# Altium footprint library Connector.PcbLib: 272 footprints (part 6 of 17)
Each footprint in its own frame and in the unit in brackets; x right, y up, seen from the top. Pads: shape width x height; smd on the part's side, far side on the other; paste and mask are expansions set on the pad; w line width, h text height; cw(c..) or ccw(c..) is an arc to the next point about the centre after c.
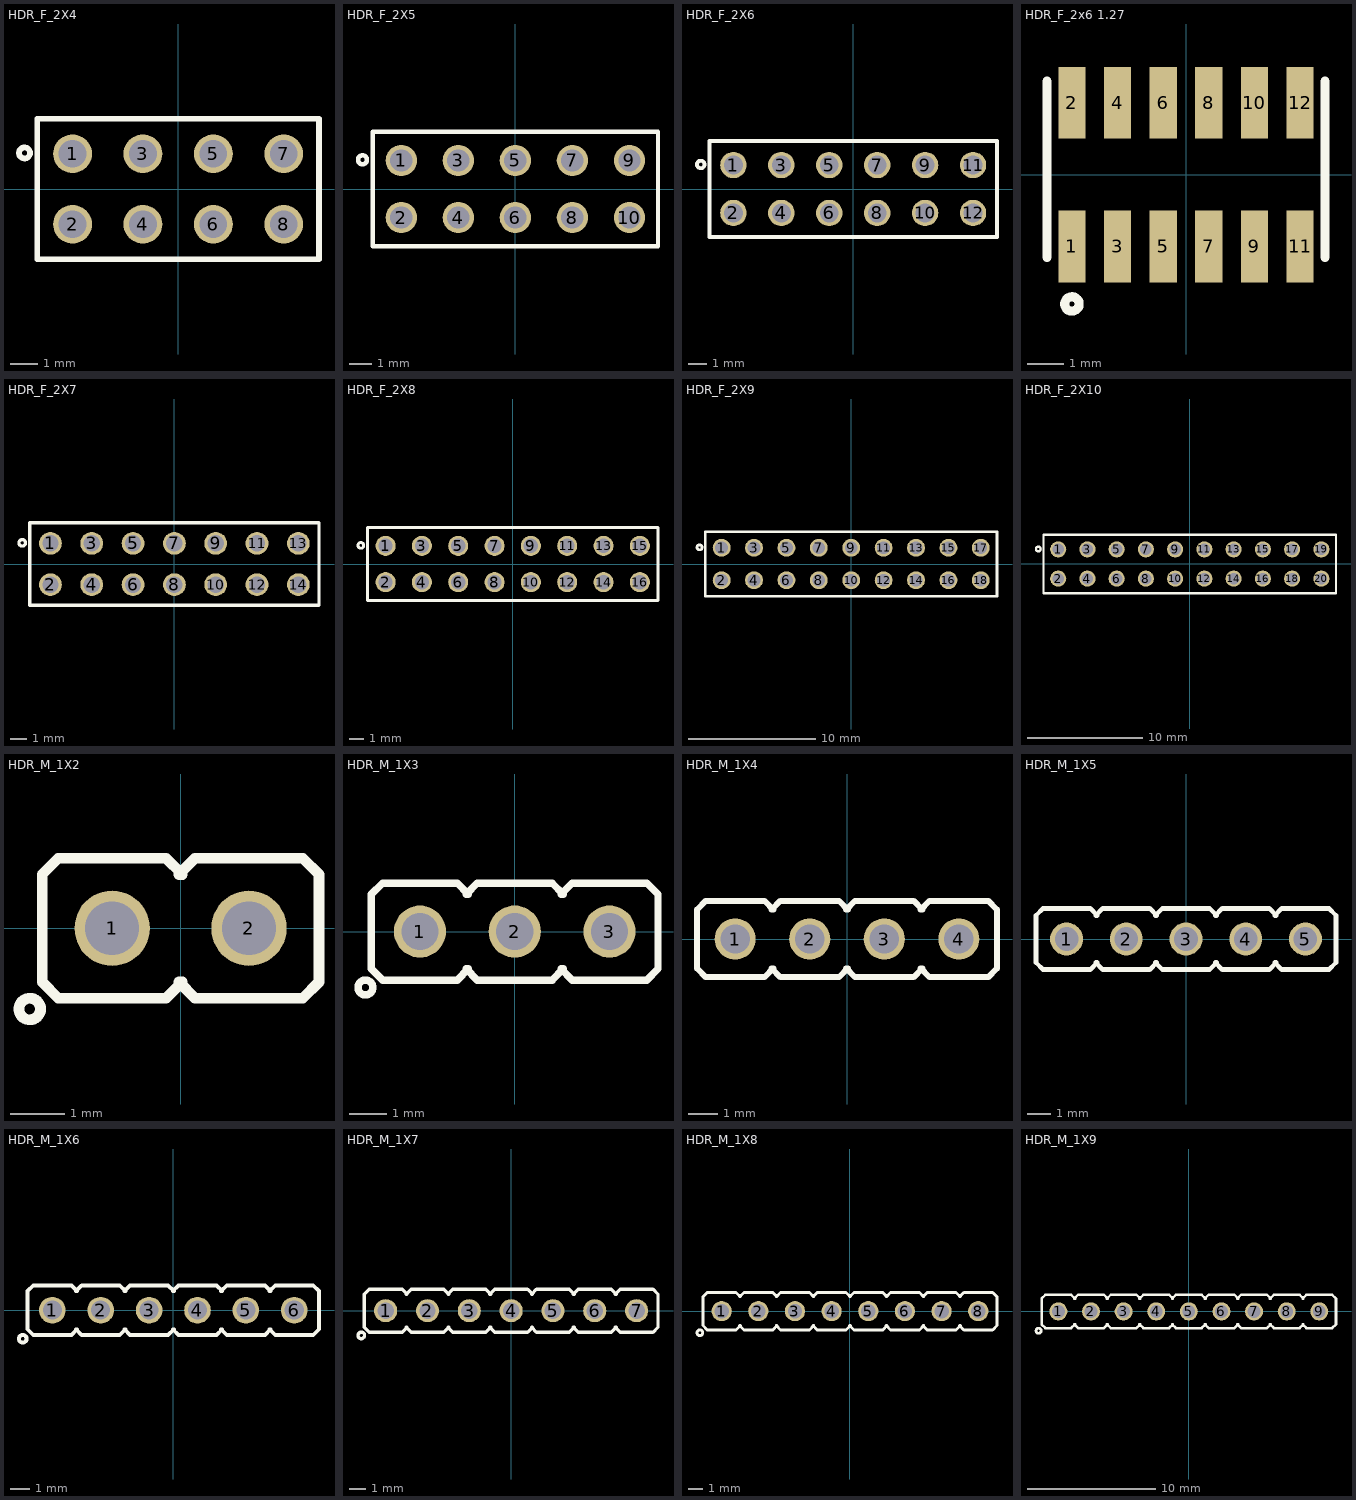
[diagram p5: the footprints below, top view; thin cyan lines are the x and y axes]

## HDR_F_2X4 [mm] "Connector; Header; 4x2 Position"
height 8
pads (8):
  round 1.4 / inner round 1.4 / far side oval 1.4x2.2 hole 1: 1(-3.81,1.27) 2(-3.81,-1.27) 3(-1.27,1.27) 4(-1.27,-1.27) 5(1.27,1.27) 6(1.27,-1.27) 7(3.81,1.27) 8(3.81,-1.27)
Top Overlay:
  circle w0.2: c-5.54,1.3 r0.2
  lines w0.2: -5.08,-2.54 -5.08,2.54 5.08,2.54 5.08,-2.54 -5.08,-2.54
Top Designator:
  text ".Designator" at -4.04,-0.344 h1.52
3D body "PBD-2.stp": height 8.5, standoff -3.15, extent 2.54,-2.54 5.08,2.54
3D body "PBD-2.stp": height 8.5, standoff -3.15, extent 0,-2.54 2.54,2.54
3D body "PBD-2.stp": height 8.5, standoff -3.15, extent -2.54,-2.54 0,2.54
3D body "PBD-2.stp": height 8.5, standoff -3.15, extent -5.08,-2.54 -2.54,2.54

## HDR_F_2X5 [mm] "Connector; Header; 5x2 Position"
height 8
pads (10):
  round 1.4 / inner round 1.4 / far side oval 1.4x2.2 hole 1: 1(-5.08,1.27) 2(-5.08,-1.27) 3(-2.54,1.27) 4(-2.54,-1.27) 5(0,1.27) 6(0,-1.27) 7(2.54,1.27) 8(2.54,-1.27) 9(5.08,1.27) 10(5.08,-1.27)
Top Overlay:
  circle w0.2: c-6.81,1.3 r0.2
  lines w0.2: -6.35,-2.54 -6.35,2.54 6.35,2.54 6.35,-2.54 -6.35,-2.54
Top Designator:
  text ".Designator" at -4.04,-0.344 h1.52
3D body "PBD-2.stp": height 8.5, standoff -3.15, extent 3.81,-2.54 6.35,2.54
3D body "PBD-2.stp": height 8.5, standoff -3.15, extent -1.27,-2.54 1.27,2.54
3D body "PBD-2.stp": height 8.5, standoff -3.15, extent 1.27,-2.54 3.81,2.54
3D body "PBD-2.stp": height 8.5, standoff -3.15, extent -6.35,-2.54 -3.81,2.54
3D body "PBD-2.stp": height 8.5, standoff -3.15, extent -3.81,-2.54 -1.27,2.54

## HDR_F_2X6 [mm] "Connector; Header; 6x2 Position"
height 8
pads (12):
  round 1.4 / inner round 1.4 / far side oval 1.4x2.2 hole 1: 1(-6.35,1.27) 2(-6.35,-1.27) 3(-3.81,1.27) 4(-3.81,-1.27) 5(-1.27,1.27) 6(-1.27,-1.27) 7(1.27,1.27) 8(1.27,-1.27) 9(3.81,1.27) 10(3.81,-1.27) 11(6.35,1.27) 12(6.35,-1.27)
Top Overlay:
  circle w0.2: c-8.08,1.3 r0.2
  lines w0.2: -7.62,-2.54 -7.62,2.54 7.62,2.54 7.62,-2.54 -7.62,-2.54
Top Designator:
  text ".Designator" at -4.04,-0.344 h1.52
3D body "PBD-2.stp": height 8.5, standoff -3.15, extent 2.54,-2.54 5.08,2.54
3D body "PBD-2.stp": height 8.5, standoff -3.15, extent 5.08,-2.54 7.62,2.54
3D body "PBD-2.stp": height 8.5, standoff -3.15, extent -2.54,-2.54 0,2.54
3D body "PBD-2.stp": height 8.5, standoff -3.15, extent 0,-2.54 2.54,2.54
3D body "PBD-2.stp": height 8.5, standoff -3.15, extent -7.62,-2.54 -5.08,2.54
3D body "PBD-2.stp": height 8.5, standoff -3.15, extent -5.08,-2.54 -2.54,2.54

## HDR_F_2x6 1.27 [mm]
pads (12):
  rect 0.76x2 smd: 1(-3.175,-2) 2(-3.175,2) 3(-1.905,-2) 4(-1.905,2) 5(-0.635,-2) 6(-0.635,2) 7(0.635,-2) 8(0.635,2) 9(1.905,-2) 10(1.905,2) 11(3.175,-2) 12(3.175,2)
Top Overlay:
  circle w0.254: c-3.175,-3.6 r0.2
  lines w0.254: -3.873,-2.3 -3.873,2.6 ; 3.873,-2.3 3.873,2.6
Top Designator:
  text ".Designator" at -3.71,-0.757 h1.52
3D body "User Library-1_27x1_27-SMD-female-2x2.step": height 4.51, standoff 0.01, extent -4,-2.2 -1.08,2.4
3D body "User Library-1_27x1_27-SMD-female-2x2.step": height 4.51, standoff 0.01, extent 1.08,-2.2 4,2.4
3D body "User Library-1_27x1_27-SMD-female-2x2.step": height 4.51, standoff 0.01, extent -1.46,-2.2 1.46,2.4

## HDR_F_2X7 [mm] "Connector; Header; 7x2 Position"
height 10.5
pads (14):
  round 1.4 / inner round 1.4 / far side oval 1.4x2.2 hole 1: 1(-7.62,1.27) 2(-7.62,-1.27) 3(-5.08,1.27) 4(-5.08,-1.27) 5(-2.54,1.27) 6(-2.54,-1.27) 7(0,1.27) 8(0,-1.27) 9(2.54,1.27) 10(2.54,-1.27) 11(5.08,1.27) 12(5.08,-1.27) 13(7.62,1.27) 14(7.62,-1.27)
Top Overlay:
  circle w0.2: c-9.35,1.3 r0.2
  lines w0.2: -8.89,-2.54 -8.89,2.54 8.89,2.54 8.89,-2.54 -8.89,-2.54
Top Designator:
  text ".Designator" at -4.04,-0.344 h1.52
3D body "PBD-2.stp": height 8.5, standoff -3.15, extent 6.35,-2.54 8.89,2.54
3D body "PBD-2.stp": height 8.5, standoff -3.15, extent 3.81,-2.54 6.35,2.54
3D body "PBD-2.stp": height 8.5, standoff -3.15, extent 1.27,-2.54 3.81,2.54
3D body "PBD-2.stp": height 8.5, standoff -3.15, extent -1.27,-2.54 1.27,2.54
3D body "PBD-2.stp": height 8.5, standoff -3.15, extent -3.81,-2.54 -1.27,2.54
3D body "PBD-2.stp": height 8.5, standoff -3.15, extent -6.35,-2.54 -3.81,2.54
3D body "PBD-2.stp": height 8.5, standoff -3.15, extent -8.89,-2.54 -6.35,2.54

## HDR_F_2X8 [mm] "Connector; Header; 8x2 Position"
height 8
pads (16):
  round 1.4 / inner round 1.4 / far side oval 1.4x2.2 hole 1: 1(-8.89,1.27) 2(-8.89,-1.27) 3(-6.35,1.27) 4(-6.35,-1.27) 5(-3.81,1.27) 6(-3.81,-1.27) 7(-1.27,1.27) 8(-1.27,-1.27) 9(1.27,1.27) 10(1.27,-1.27) 11(3.81,1.27) 12(3.81,-1.27) 13(6.35,1.27) 14(6.35,-1.27) 15(8.89,1.27) 16(8.89,-1.27)
Top Overlay:
  circle w0.2: c-10.62,1.3 r0.2
  lines w0.2: -10.16,-2.54 10.16,-2.54 10.16,2.54 -10.16,2.54 -10.16,-2.54
Top Designator:
  text ".Designator" at -4.04,-0.344 h1.52
3D body "PBD-2.stp": height 8.5, standoff -3.15, extent -7.62,-2.54 -5.08,2.54
3D body "PBD-2.stp": height 8.5, standoff -3.15, extent -10.16,-2.54 -7.62,2.54
3D body "PBD-2.stp": height 8.5, standoff -3.15, extent -2.54,-2.54 0,2.54
3D body "PBD-2.stp": height 8.5, standoff -3.15, extent -5.08,-2.54 -2.54,2.54
3D body "PBD-2.stp": height 8.5, standoff -3.15, extent 2.54,-2.54 5.08,2.54
3D body "PBD-2.stp": height 8.5, standoff -3.15, extent 0,-2.54 2.54,2.54
3D body "PBD-2.stp": height 8.5, standoff -3.15, extent 7.62,-2.54 10.16,2.54
3D body "PBD-2.stp": height 8.5, standoff -3.15, extent 5.08,-2.54 7.62,2.54

## HDR_F_2X9 [mm] "Connector; Header; 9x2 Position"
height 8
pads (18):
  round 1.4 / inner round 1.4 / far side oval 1.4x2.2 hole 1: 1(-10.16,1.27) 2(-10.16,-1.27) 3(-7.62,1.27) 4(-7.62,-1.27) 5(-5.08,1.27) 6(-5.08,-1.27) 7(-2.54,1.27) 8(-2.54,-1.27) 9(0,1.27) 10(0,-1.27) 11(2.54,1.27) 12(2.54,-1.27) 13(5.08,1.27) 14(5.08,-1.27) 15(7.62,1.27) 16(7.62,-1.27) 17(10.16,1.27) 18(10.16,-1.27)
Top Overlay:
  circle w0.2: c-11.89,1.3 r0.2
  lines w0.2: -11.43,-2.54 11.43,-2.54 11.43,2.54 -11.43,2.54 -11.43,-2.54
Top Designator:
  text ".Designator" at -4.04,-0.344 h1.52
3D body "PBD-2.stp": height 8.5, standoff -3.15, extent 3.81,-2.54 6.35,2.54
3D body "PBD-2.stp": height 8.5, standoff -3.15, extent 6.35,-2.54 8.89,2.54
3D body "PBD-2.stp": height 8.5, standoff -3.15, extent -1.27,-2.54 1.27,2.54
3D body "PBD-2.stp": height 8.5, standoff -3.15, extent 1.27,-2.54 3.81,2.54
3D body "PBD-2.stp": height 8.5, standoff -3.15, extent -6.35,-2.54 -3.81,2.54
3D body "PBD-2.stp": height 8.5, standoff -3.15, extent -3.81,-2.54 -1.27,2.54
3D body "PBD-2.stp": height 8.5, standoff -3.15, extent -11.43,-2.54 -8.89,2.54
3D body "PBD-2.stp": height 8.5, standoff -3.15, extent -8.89,-2.54 -6.35,2.54
3D body "PBD-2.stp": height 8.5, standoff -3.15, extent 8.89,-2.54 11.43,2.54

## HDR_F_2X10 [mm] "Connector; Header; 10x2 Position"
height 8
pads (20):
  round 1.4 / inner round 1.4 / far side oval 1.4x2.2 hole 1: 1(-11.43,1.27) 2(-11.43,-1.27) 3(-8.89,1.27) 4(-8.89,-1.27) 5(-6.35,1.27) 6(-6.35,-1.27) 7(-3.81,1.27) 8(-3.81,-1.27) 9(-1.27,1.27) 10(-1.27,-1.27) 11(1.27,1.27) 12(1.27,-1.27) 13(3.81,1.27) 14(3.81,-1.27) 15(6.35,1.27) 16(6.35,-1.27) 17(8.89,1.27) 18(8.89,-1.27) 19(11.43,1.27) 20(11.43,-1.27)
Top Overlay:
  circle w0.2: c-13.16,1.3 r0.2
  lines w0.2: -12.7,-2.54 -12.7,2.54 12.7,2.54 12.7,-2.54 -12.7,-2.54
Top Designator:
  text ".Designator" at -4.04,-0.344 h1.52
3D body "PBD-2.stp": height 8.5, standoff -3.15, extent -12.7,-2.54 -10.16,2.54
3D body "PBD-2.stp": height 8.5, standoff -3.15, extent 10.16,-2.54 12.7,2.54
3D body "PBD-2.stp": height 8.5, standoff -3.15, extent 7.62,-2.54 10.16,2.54
3D body "PBD-2.stp": height 8.5, standoff -3.15, extent 5.08,-2.54 7.62,2.54
3D body "PBD-2.stp": height 8.5, standoff -3.15, extent 2.54,-2.54 5.08,2.54
3D body "PBD-2.stp": height 8.5, standoff -3.15, extent 0,-2.54 2.54,2.54
3D body "PBD-2.stp": height 8.5, standoff -3.15, extent -2.54,-2.54 0,2.54
3D body "PBD-2.stp": height 8.5, standoff -3.15, extent -5.08,-2.54 -2.54,2.54
3D body "PBD-2.stp": height 8.5, standoff -3.15, extent -7.62,-2.54 -5.08,2.54
3D body "PBD-2.stp": height 8.5, standoff -3.15, extent -10.16,-2.54 -7.62,2.54

## HDR_M_1X2 [mm] "Connector; Header; 2 Position"
pads (2):
  round 1.4 / inner round 1.4 / far side oval 1.4x2.2 hole 1 mask+0.1: 1(-1.27,0) 2(1.27,0)
Top Overlay:
  circle w0.2: c-2.8,-1.5 r0.2
  lines w0.2: -0.03,-1 0.27,-1.3 2.27,-1.3 2.57,-1 2.57,1 2.27,1.3 0.27,1.3 -0.03,1 ; 0.03,-1 -0.27,-1.3 -2.27,-1.3 -2.57,-1 -2.57,1 -2.27,1.3 -0.27,1.3 0.03,1
Top Designator:
  text ".Designator" at -3.925,-0.544 h1.52
3D body "pin_header_aw140-eg-g02a.stp": height 8.72, standoff -3.68, extent -2.54,-1.25 2.44,1.25

## HDR_M_1X3 [mm] "Connector; Header; 3 Position"
pads (3):
  round 1.4 / inner round 1.4 / far side oval 1.4x2.2 hole 1 mask+0.1: 1(-2.54,0) 2(0,0) 3(2.54,0)
Top Overlay:
  circle w0.2: c-4,-1.5 r0.2
  lines w0.2: -1.3,-1 -1,-1.3 1,-1.3 1.3,-1 ; -1.3,1 -1,1.3 1,1.3 1.3,1 ; -1.24,-1 -1.54,-1.3 -3.54,-1.3 -3.84,-1 -3.84,1 -3.54,1.3 -1.54,1.3 -1.24,1 ; 1.24,-1 1.54,-1.3 3.54,-1.3 3.84,-1 3.84,1 3.54,1.3 1.54,1.3 1.24,1
Top Designator:
  text ".Designator" at -3.89,-0.544 h1.52
3D body "pin_header_aw140-eg-g03d.stp": height 8.2, standoff -3, extent -3.81,-1.249 3.81,1.249

## HDR_M_1X4 [mm] "Connector; Header; 2 Position"
pads (4):
  round 1.4 / inner round 1.4 / far side oval 1.4x2.2 hole 1 mask+0.1: 1(-3.81,0) 2(-1.27,0) 3(1.27,0) 4(3.81,0)
Top Overlay:
  lines w0.2: -2.57,-1 -2.27,-1.3 -0.27,-1.3 0.03,-1 ; -2.57,1 -2.27,1.3 -0.27,1.3 0.03,1 ; -2.51,-1 -2.81,-1.3 -4.81,-1.3 -5.11,-1 -5.11,1 -4.81,1.3 -2.81,1.3 -2.51,1 ; -0.03,-1 0.27,-1.3 2.27,-1.3 2.57,-1 ; -0.03,1 0.27,1.3 2.27,1.3 2.57,1 ; 2.51,-1 2.81,-1.3 4.81,-1.3 5.11,-1 5.11,1 4.81,1.3 2.81,1.3 2.51,1
Top Designator:
  text ".Designator" at -3.71,-0.344 h1.52
3D body "pin_header_aw140-eg-g02a.stp": height 8.72, standoff -3.68, extent -5.08,-1.25 -0.1,1.25
3D body "pin_header_aw140-eg-g02a.stp": height 8.72, standoff -3.68, extent -2.54,-1.25 2.44,1.25
3D body "pin_header_aw140-eg-g02a.stp": height 8.72, standoff -3.68, extent 0,-1.25 4.98,1.25

## HDR_M_1X5 [mm] "Connector; Header; 2 Position"
pads (5):
  round 1.4 / inner round 1.4 / far side oval 1.4x2.2 hole 1 mask+0.1: 1(-5.08,0) 2(-2.54,0) 3(0,0) 4(2.54,0) 5(5.08,0)
Top Overlay:
  lines w0.2: -3.84,-1 -3.54,-1.3 -1.54,-1.3 -1.24,-1 ; -3.84,1 -3.54,1.3 -1.54,1.3 -1.24,1 ; -3.78,-1 -4.08,-1.3 -6.08,-1.3 -6.38,-1 -6.38,1 -6.08,1.3 -4.08,1.3 -3.78,1 ; -1.3,-1 -1,-1.3 1,-1.3 1.3,-1 ; -1.3,1 -1,1.3 1,1.3 1.3,1 ; 1.24,-1 1.54,-1.3 3.54,-1.3 3.84,-1 ; 1.24,1 1.54,1.3 3.54,1.3 3.84,1 ; 3.78,-1 4.08,-1.3 6.08,-1.3 6.38,-1 6.38,1 6.08,1.3 4.08,1.3 3.78,1
Top Designator:
  text ".Designator" at -3.71,-0.344 h1.52
3D body "pin_header_aw140-eg-g02a.stp": height 8.72, standoff -3.68, extent -6.35,-1.25 -1.37,1.25
3D body "pin_header_aw140-eg-g02a.stp": height 8.72, standoff -3.68, extent -3.81,-1.25 1.17,1.25
3D body "pin_header_aw140-eg-g02a.stp": height 8.72, standoff -3.68, extent -1.27,-1.25 3.71,1.25
3D body "pin_header_aw140-eg-g02a.stp": height 8.72, standoff -3.68, extent 1.27,-1.25 6.25,1.25

## HDR_M_1X6 [mm] "Connector; Header; 6 Position"
pads (6):
  round 1.4 / inner round 1.4 / far side oval 1.4x2.2 hole 1 mask+0.1: 1(-6.35,0) 2(-3.81,0) 3(-1.27,0) 4(1.27,0) 5(3.81,0) 6(6.35,0)
Top Overlay:
  circle w0.2: c-7.9,-1.5 r0.2
  lines w0.2: -5.11,-1 -4.81,-1.3 -2.81,-1.3 -2.51,-1 ; -5.11,1 -4.81,1.3 -2.81,1.3 -2.51,1 ; -5.05,-1 -5.35,-1.3 -7.35,-1.3 -7.65,-1 -7.65,1 -7.35,1.3 -5.35,1.3 -5.05,1 ; -2.57,-1 -2.27,-1.3 -0.27,-1.3 0.03,-1 ; -2.57,1 -2.27,1.3 -0.27,1.3 0.03,1 ; -0.03,-1 0.27,-1.3 2.27,-1.3 2.57,-1 ; -0.03,1 0.27,1.3 2.27,1.3 2.57,1 ; 2.51,-1 2.81,-1.3 4.81,-1.3 5.11,-1 ; 2.51,1 2.81,1.3 4.81,1.3 5.11,1 ; 5.05,-1 5.35,-1.3 7.35,-1.3 7.65,-1 7.65,1 7.35,1.3 5.35,1.3 5.05,1
Top Designator:
  text ".Designator" at -3.935,-0.544 h1.52
3D body "pin_header_aw140-eg-g06d.stp": height 8.2, standoff -3, extent -7.62,-1.249 7.62,1.249

## HDR_M_1X7 [mm] "Connector; Header; 7 Position"
pads (7):
  round 1.4 / inner round 1.4 / far side oval 1.4x2.2 hole 1 mask+0.1: 1(-7.62,0) 2(-5.08,0) 3(-2.54,0) 4(0,0) 5(2.54,0) 6(5.08,0) 7(7.62,0)
Top Overlay:
  circle w0.2: c-9.1,-1.5 r0.2
  lines w0.2: -6.38,-1 -6.08,-1.3 -4.08,-1.3 -3.78,-1 ; -6.38,1 -6.08,1.3 -4.08,1.3 -3.78,1 ; -6.32,-1 -6.62,-1.3 -8.62,-1.3 -8.92,-1 -8.92,1 -8.62,1.3 -6.62,1.3 -6.32,1 ; -3.84,-1 -3.54,-1.3 -1.54,-1.3 -1.24,-1 ; -3.84,1 -3.54,1.3 -1.54,1.3 -1.24,1 ; -1.3,-1 -1,-1.3 1,-1.3 1.3,-1 ; -1.3,1 -1,1.3 1,1.3 1.3,1 ; 1.24,-1 1.54,-1.3 3.54,-1.3 3.84,-1 ; 1.24,1 1.54,1.3 3.54,1.3 3.84,1 ; 3.78,-1 4.08,-1.3 6.08,-1.3 6.38,-1 ; 3.78,1 4.08,1.3 6.08,1.3 6.38,1 ; 6.32,-1 6.62,-1.3 8.62,-1.3 8.92,-1 8.92,1 8.62,1.3 6.62,1.3 6.32,1
Top Designator:
  text ".Designator" at -3.9,-0.544 h1.52
3D body "pin_header_aw140-eg-g07d.stp": height 8.2, standoff -3, extent -8.89,-1.249 8.89,1.249

## HDR_M_1X8 [mm] "Connector; Header; 8 Position"
pads (8):
  round 1.4 / inner round 1.4 / far side oval 1.4x2.2 hole 1 mask+0.1: 1(-8.89,0) 2(-6.35,0) 3(-3.81,0) 4(-1.27,0) 5(1.27,0) 6(3.81,0) 7(6.35,0) 8(8.89,0)
Top Overlay:
  circle w0.2: c-10.4,-1.5 r0.2
  lines w0.2: -7.65,-1 -7.35,-1.3 -5.35,-1.3 -5.05,-1 ; -7.65,1 -7.35,1.3 -5.35,1.3 -5.05,1 ; -7.59,-1 -7.89,-1.3 -9.89,-1.3 -10.19,-1 -10.19,1 -9.89,1.3 -7.89,1.3 -7.59,1 ; -5.11,-1 -4.81,-1.3 -2.81,-1.3 -2.51,-1 ; -5.11,1 -4.81,1.3 -2.81,1.3 -2.51,1 ; -2.57,-1 -2.27,-1.3 -0.27,-1.3 0.03,-1 ; -2.57,1 -2.27,1.3 -0.27,1.3 0.03,1 ; -0.03,-1 0.27,-1.3 2.27,-1.3 2.57,-1 ; -0.03,1 0.27,1.3 2.27,1.3 2.57,1 ; 2.51,-1 2.81,-1.3 4.81,-1.3 5.11,-1 ; 2.51,1 2.81,1.3 4.81,1.3 5.11,1 ; 5.05,-1 5.35,-1.3 7.35,-1.3 7.65,-1 ; 5.05,1 5.35,1.3 7.35,1.3 7.65,1 ; 7.59,-1 7.89,-1.3 9.89,-1.3 10.19,-1 10.19,1 9.89,1.3 7.89,1.3 7.59,1
Top Designator:
  text ".Designator" at -3.915,-0.544 h1.52
3D body "pin_header_aw140-eg-g08d.stp": height 8.2, standoff -3, extent -10.16,-1.249 10.16,1.249

## HDR_M_1X9 [mm] "Connector; Header; 9 Position"
pads (9):
  round 1.4 / inner round 1.4 / far side oval 1.4x2.2 hole 1 mask+0.1: 1(-10.16,0) 2(-7.62,0) 3(-5.08,0) 4(-2.54,0) 5(0,0) 6(2.54,0) 7(5.08,0) 8(7.62,0) 9(10.16,0)
Top Overlay:
  circle w0.2: c-11.7,-1.5 r0.2
  lines w0.2: -8.92,-1 -8.62,-1.3 -6.62,-1.3 -6.32,-1 ; -8.92,1 -8.62,1.3 -6.62,1.3 -6.32,1 ; -8.86,-1 -9.16,-1.3 -11.16,-1.3 -11.46,-1 -11.46,1 -11.16,1.3 -9.16,1.3 -8.86,1 ; -6.38,-1 -6.08,-1.3 -4.08,-1.3 -3.78,-1 ; -6.38,1 -6.08,1.3 -4.08,1.3 -3.78,1 ; -3.84,-1 -3.54,-1.3 -1.54,-1.3 -1.24,-1 ; -3.84,1 -3.54,1.3 -1.54,1.3 -1.24,1 ; -1.3,-1 -1,-1.3 1,-1.3 1.3,-1 ; -1.3,1 -1,1.3 1,1.3 1.3,1 ; 1.24,-1 1.54,-1.3 3.54,-1.3 3.84,-1 ; 1.24,1 1.54,1.3 3.54,1.3 3.84,1 ; 3.78,-1 4.08,-1.3 6.08,-1.3 6.38,-1 ; 3.78,1 4.08,1.3 6.08,1.3 6.38,1 ; 6.32,-1 6.62,-1.3 8.62,-1.3 8.92,-1 ; 6.32,1 6.62,1.3 8.62,1.3 8.92,1 ; 8.86,-1 9.16,-1.3 11.16,-1.3 11.46,-1 11.46,1 11.16,1.3 9.16,1.3 8.86,1
Top Designator:
  text ".Designator" at -3.93,-0.544 h1.52
3D body "pin_header_aw140-eg-g09d.stp": height 8.2, standoff -3, extent -11.43,-1.249 11.43,1.249